# Altium footprint library AVP32F069_EVM_Rev1.0_220506.PcbLib: 40 footprints (part 2 of 3)
Each footprint in its own frame and in the unit in brackets; x right, y up, seen from the top. Pads: shape width x height; smd on the part's side, far side on the other; paste and mask are expansions set on the pad; w line width, h text height; cw(c..) or ccw(c..) is an arc to the next point about the centre after c.
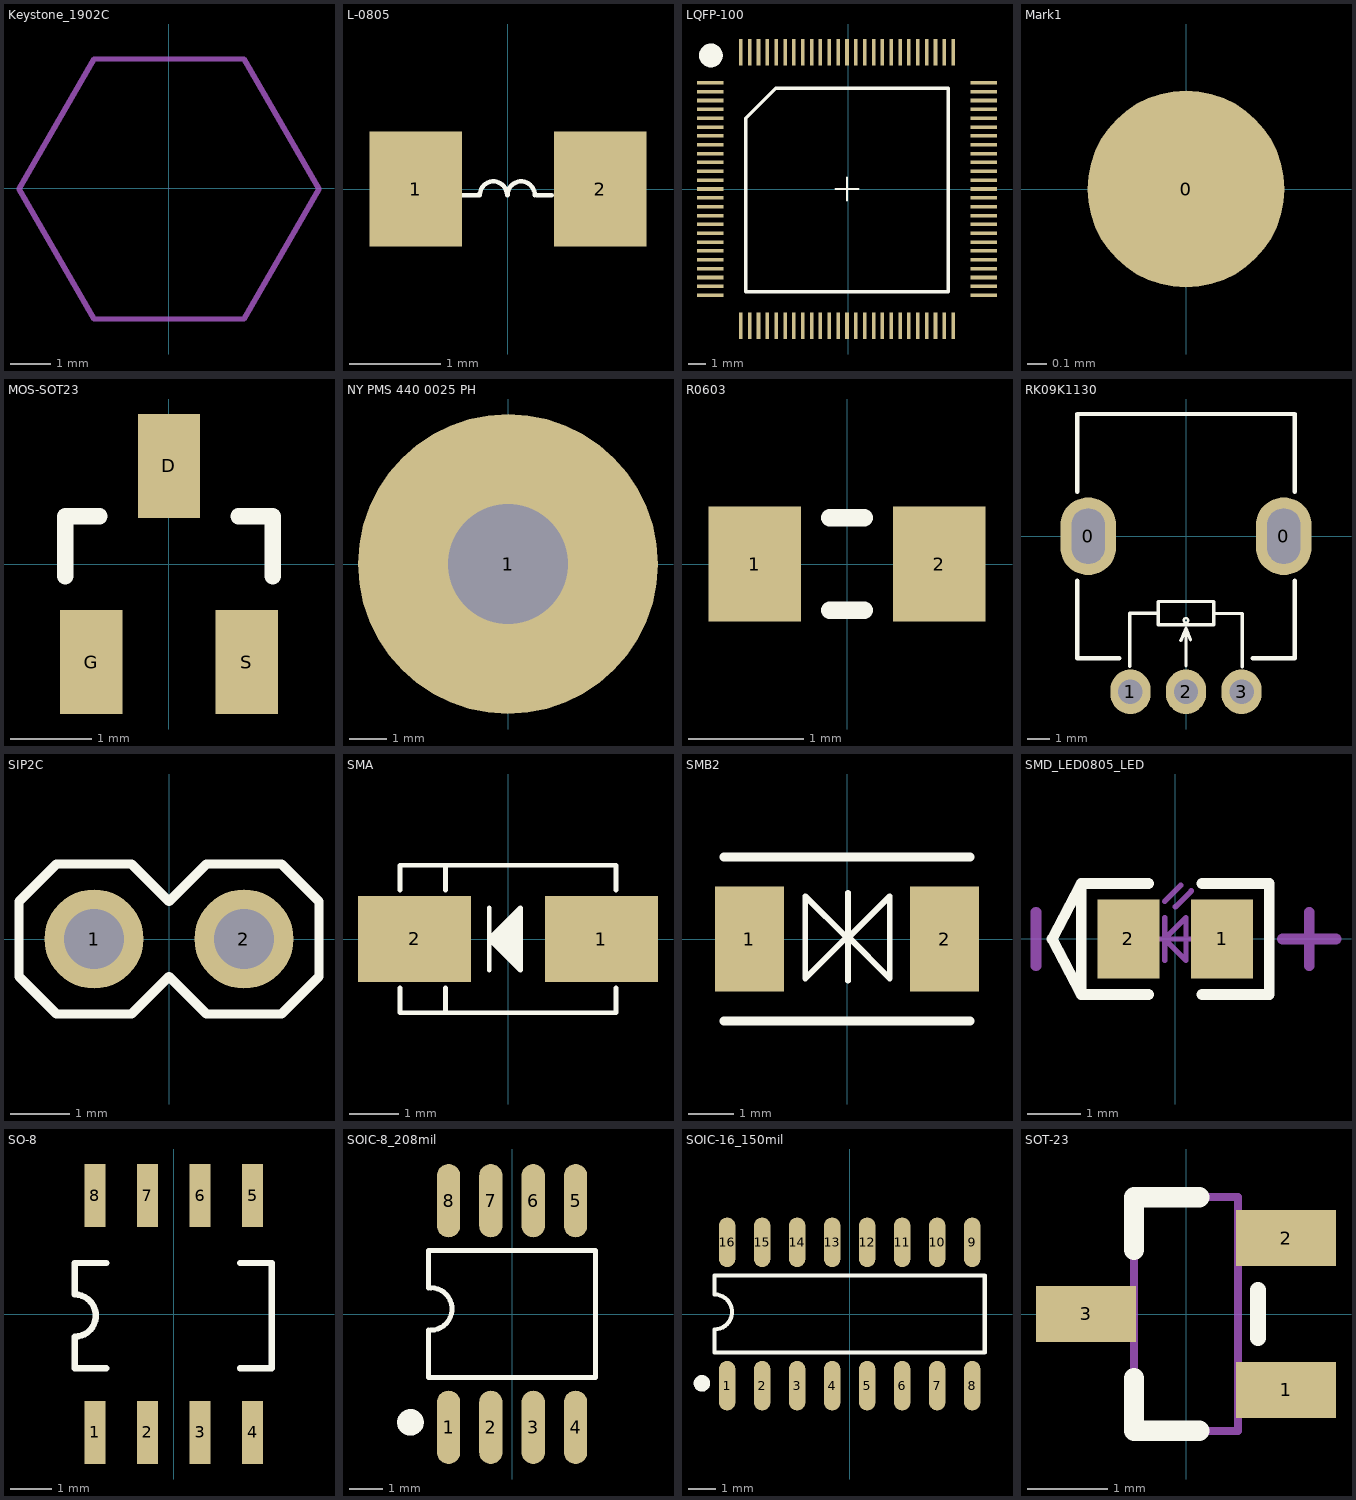
[diagram p1: the footprints below, top view; thin cyan lines are the x and y axes]

## Keystone_1902C [mil] "Hex Standoff, 4-40 threaded, nylon"
height 500
pads (1):
  round 1 on Mech4: 0(0,0)
Mechanical 6:
  lines w5: -145.29,-0.49 -72.56,125.49 72.92,125.49 145.65,-0.49 72.92,-126.47 -72.56,-126.47 -145.29,-0.49
3D body "Keystone_1902C.stp": height 501, standoff 1, extent -144.95,-125.98 146,125.98

## L-0805 [mil] "标准型  间距40mil 电感"
height 196.85
pads (2):
  rect 40x50 smd: 1(-40,0) 2(40,0)
Top Overlay:
  lines w1.97: -20,-2.61 -13,-2.61 ; -12.22,-2.62 cw(c-6.32,-2.62) -0.41,-2.62 ; -0.22,-2.62 cw(c5.68,-2.62) 11.59,-2.62 ; 12.53,-2.61 19,-2.61
3D body "User Library-Ferrite Beads(BLM21PG221SZ1D).step": height 36.42, standoff 2.95, extent -39.37,-25.6 39.37,23.61

## LQFP-100 [mm]
pads (100):
  rect 1.5x0.2 smd: 1(-7.807,6.006) 2(-7.807,5.506) 3(-7.807,5.006) 4(-7.807,4.506) 5(-7.807,4.006) 6(-7.807,3.506) 7(-7.807,3.006) 8(-7.807,2.506) 9(-7.807,2.006) 10(-7.807,1.506) 11(-7.807,1.006) 12(-7.807,0.506) 13(-7.807,0.006) 14(-7.807,-0.494) 15(-7.807,-0.994) 16(-7.807,-1.494) 17(-7.807,-1.994) 18(-7.807,-2.494) 19(-7.807,-2.994) 20(-7.807,-3.494) 21(-7.807,-3.994) 22(-7.807,-4.494) 23(-7.807,-4.994) 24(-7.807,-5.494) 25(-7.807,-5.994) 51(7.643,-5.994) 52(7.643,-5.494) 53(7.643,-4.994) 54(7.643,-4.494) 55(7.643,-3.994) 56(7.643,-3.494) 57(7.643,-2.994) 58(7.643,-2.494) 59(7.643,-1.994) 60(7.643,-1.494) 61(7.643,-0.994) 62(7.643,-0.494) 63(7.643,0.006) 64(7.643,0.506) 65(7.643,1.006) 66(7.643,1.506) 67(7.643,2.006) 68(7.643,2.506) 69(7.643,3.006) 70(7.643,3.506) 71(7.643,4.006) 72(7.643,4.506) 73(7.643,5.006) 74(7.643,5.506) 75(7.643,6.006)
  rect 0.2x1.5 smd: 26(-6.082,-7.719) 27(-5.582,-7.719) 28(-5.082,-7.719) 29(-4.582,-7.719) 30(-4.082,-7.719) 31(-3.582,-7.719) 32(-3.082,-7.719) 33(-2.582,-7.719) 34(-2.082,-7.719) 35(-1.582,-7.719) 36(-1.082,-7.719) 37(-0.582,-7.719) 38(-0.082,-7.719) 39(0.418,-7.719) 40(0.918,-7.719) 41(1.418,-7.719) 42(1.918,-7.719) 43(2.418,-7.719) 44(2.918,-7.719) 45(3.418,-7.719) 46(3.918,-7.719) 47(4.418,-7.719) 48(4.918,-7.719) 49(5.418,-7.719) 50(5.918,-7.719) 76(5.918,7.731) 77(5.418,7.731) 78(4.918,7.731) 79(4.418,7.731) 80(3.918,7.731) 81(3.418,7.731) 82(2.918,7.731) 83(2.418,7.731) 84(1.918,7.731) 85(1.418,7.731) 86(0.918,7.731) 87(0.418,7.731) 88(-0.082,7.731) 89(-0.582,7.731) 90(-1.082,7.731) 91(-1.582,7.731) 92(-2.082,7.731) 93(-2.582,7.731) 94(-3.082,7.731) 95(-3.582,7.731) 96(-4.082,7.731) 97(-4.582,7.731) 98(-5.082,7.731) 99(-5.582,7.731) 100(-6.082,7.731)
Top Overlay:
  circle w0.7: c-7.77,7.55 r0.32
  lines w0.127: -0.717,0.006 0.553,0.006 ; -0.082,-0.629 -0.082,0.641
  lines w0.2: -5.8,-5.35 -5.8,4 -4.1,5.7 5.65,5.7 5.65,-5.8 -5.8,-5.8 -5.8,-4.8
3D body "User Library-P-LQFP100-14x14-0_50.STEP": height 2, standoff 0, extent -8.176,-8.1 8.024,8.1

## Mark1 [mm] "基准点 无边框"
pads (1):
  round 1 all layers, no hole: 0(0,0)
Top Solder:
  circle w0.5: c0,0 r0.762
Bottom Solder:
  circle w0.5: c0,0 r0.762

## MOS-SOT23 [mm] "焊盘加长型"
height 2
pads (3):
  rect 0.762x1.27 smd: D(0,1.2) G(-0.95,-1.2) S(0.95,-1.2)
Top Overlay:
  lines w0.2: -1.27,-0.15 -1.27,0.584 -0.85,0.584 ; 0.85,0.584 1.27,0.584 1.27,-0.15
3D body "SOT-23-3.STEP": height 1.2, standoff 0, extent -1.45,-1.502 1.45,1.298

## NY PMS 440 0025 PH [mm] "4-40 nylon screw and mounting hole"
height 1.905
pads (1):
  round 8 hole 3.2: 1(0,0)
Mechanical 5:
  circle w0.127: c0,0 r3.789
3D body "B_F_NY PMS 440 0025 PH.stp": height 2.69, standoff -8.74, extent -3.302,-3.3 3.296,3.3

## R0603 [mm] "无丝印 脚距1.6mm  0.8/1mm 焊盘"
height 1.2
pads (2):
  rect 0.8x1 smd mask+0.051: 1(-0.8,0) 2(0.8,0)
Top Overlay:
  lines w0.152: -0.15,-0.4 0.15,-0.4 ; -0.15,0.4 0.15,0.4
3D body "RES-0603.step": height 0.43, standoff -0.03, extent -0.786,-0.4 0.814,0.4

## RK09K1130 [mm] "立式可调电位器"
height 9.5
pads (5):
  oval 2.5x3.5 hole 1.5 slot 2.5 at 90 deg: 0(-4.4,0) 0(4.4,0)
  oval 1.8x2 hole 1.1: 1(-2.5,-7) 2(0,-7) 3(2.5,-7)
Top Overlay:
  circle w0.1: c-0.002,-3.784 r0.1
  lines w0.15: -2.525,-5.857 -2.525,-3.469 -1.247,-3.469 -1.247,-2.941 1.243,-2.941 1.243,-3.982 -1.247,-3.982 -1.247,-3.474 ; -0.231,-4.693 -0.002,-4.135 ; -0.002,-5.836 -0.002,-4.135 ; 0.201,-4.668 -0.002,-4.135 ; 1.243,-3.474 2.538,-3.474 ; 2.529,-5.882 2.529,-3.495
  lines w0.2: -4.9,-2 -4.9,-5.5 -3,-5.5 ; -4.9,2 -4.9,5.5 4.863,5.5 4.877,5.486 4.886,5.486 4.9,5.5 4.9,2 ; 3,-5.5 4.9,-5.5 4.9,-2
3D body "User Library-RK09K1130-20-1.step": height 19.5, standoff -4.2, extent -5.698,-7.152 5.698,5.498

## SIP2C [mil] "带短路帽"
height 47.24
pads (2):
  round 66 hole 40 paste-4: 1(-50,0) 2(50,0)
Top Overlay:
  lines w6: -100,-25 -75,-50 -25,-50 0,-25 25,-50 75,-50 100,-25 100,25 75,50 25,50 0,25 -25,50 -75,50 -100,25 -100,-25
Mechanical 16:
  rectangle: -60,-10 -40,10
  rectangle: 40,-10 60,10
3D body "User Library-PLD-2.step": height 336.22, standoff -118.11, extent -100,-50 100,50
3D body "SNT-100-XX-X.stp": height 344, standoff 104, extent -100,-52.1 100,48

## SMA [mm] "DO-214AC"
height 8
pads (2):
  rect 2.3x1.75 smd: 1(1.9,0) 2(-1.9,0)
Top Overlay:
  lines w0.1: -2.2,-1 -2.2,-1.5 2.2,-1.5 2.2,-1 ; -2.2,1 -2.2,1.5 2.2,1.5 2.2,1 ; -1.27,-1.5 -1.27,-1 ; -1.27,1 -1.27,1.5 ; -0.381,-0.635 -0.381,0.635 ; -0.381,-0.025 -0.087,-0.025 ; -0.381,0.051 0.071,0.051 ; -0.193,-0.188 -0.193,0.188 ; -0.168,-0.213 -0.168,0.213 ; -0.087,-0.294 -0.087,0.294 ; -0.011,-0.37 -0.011,0.37 ; 0.049,-0.43 0.049,0.43 ; 0.096,-0.477 0.096,0.477 0.183,0.477 0.183,-0.564 ; -0.381,0 0.254,0.635 0.254,-0.635 -0.381,0
3D body "DO-214AC.STEP": height 2.4, standoff 0, extent -2.3,-1.372 2.3,1.328

## SMB2 [mm] "双向TVS"
pads (2):
  rect 1.52x2.3 smd: 1(-2.14,0) 2(2.14,0)
Top Overlay:
  lines w0.127: 0,0.025 -0.914,0.94 -0.914,-0.864 0,0.051 ; 0.025,-0.914 0.025,1.016 ; 0.025,0.025 0.939,0.94 0.939,-0.864 0.025,0.051
  lines w0.2: -2.7,-1.8 2.7,-1.8 ; -2.7,1.8 2.7,1.8
3D body "User Library-DO-214AA SMB.step": height 2.3, standoff 0, extent -2.7,-1.8 2.7,1.8

## SMD_LED0805_LED [mm]
height 11
pads (2):
  rect 1.16x1.47 smd: 1(0.875,0) 2(-0.875,0)
Top Overlay:
  lines w0.2: -0.5,-1.035 -1.755,-1.035 ; -0.5,1.035 -1.755,1.035 ; 0.5,-1.035 1.755,-1.035 1.755,1.035 0.5,1.035 ; -1.755,-1.035 -1.755,1.035 ; -1.755,-1.035 -2.3,0 -1.755,1.035
Mechanical 13:
  lines w0.1: -0.4,0 0.4,0 ; -0.2,-0.4 -0.2,0.4 ; -0.2,0.7 0.1,1 ; 0,0.6 0.3,0.9 ; -0.2,0 0.2,0.4 0.2,-0.4 -0.2,0
Mechanical 15:
  lines w0.203: -2.6,-0.5 -2.6,0.5 ; 2,0 3,0 ; 2.5,-0.5 2.5,0.5
3D body "User Library-led_0805.step": height 1.1, standoff 0, extent -1.01,-0.625 1.01,0.625

## SO-8 [mil]
pads (8):
  rect 20x60 smd: 1(-75,-112.5) 2(-25,-112.5) 3(25,-112.5) 4(75,-112.5) 5(75,112.5) 6(25,112.5) 7(-25,112.5) 8(-75,112.5)
Top Overlay:
  lines w6: -64,-51.5 -94,-51.5 -94,-21.5 ccw(c-94,-1.5) -94,18.5 -94,48.5 -64,48.5 ; 63,-51.5 93,-51.5 93,48.5 63,48.5
3D body "m08a.stp": height 63.98, standoff 0, extent -96.45,-111.1 96.46,125.12

## SOIC-8_208mil [mm]
height 10
pads (8):
  oval 0.7x2.2 smd: 1(-1.905,-3.4) 2(-0.635,-3.4) 3(0.635,-3.4) 4(1.905,-3.4) 5(1.905,3.4) 6(0.635,3.4) 7(-0.635,3.4) 8(-1.905,3.4)
Top Overlay:
  circle w0.4: c-3.048,-3.251 r0.2
  lines w0.15: -2.5,-0.483 -2.5,-1.9 2.5,-1.9 2.5,1.9 -2.5,1.9 -2.5,0.787 ; -2.438,-0.483 ccw(c-2.438,0.152) -2.438,0.787
3D body "User Library-SOIC8_Wide_5mmx5mm.step": height 1.75, standoff -0.01, extent -2.73,-4.001 2.73,4.101

## SOIC-16_150mil [mm]
height 6.34
pads (16):
  oval 0.6x1.8 smd: 1(-4.445,-2.6) 2(-3.175,-2.6) 3(-1.905,-2.6) 4(-0.635,-2.6) 5(0.635,-2.6) 6(1.905,-2.6) 7(3.175,-2.6) 8(4.445,-2.6) 9(4.445,2.6) 10(3.175,2.6) 11(1.905,2.6) 12(0.635,2.6) 13(-0.635,2.6) 14(-1.905,2.6) 15(-3.175,2.6) 16(-4.445,2.6)
Top Overlay:
  circle w0.3: c-5.359,-2.515 r0.15
  lines w0.15: -4.902,1.397 -4.902,0.711 cw(c-4.902,0.076) -4.902,-0.559 -4.902,-1.397 -4.899,-1.4 4.9,-1.4 4.9,1.4 -4.9,1.4
3D body "SW3DPS-SO-16-DEFAULT.step": height 1.45, standoff 0, extent -5.004,-2.8 4.978,3.105

## SOT-23 [mm]
height 6.5
pads (3):
  rect 1.25x0.7 smd: 1(1.25,-0.95) 2(1.25,0.95) 3(-1.25,0)
Top Overlay:
  lines w0.2: 0.9,-0.3 0.9,0.3
  lines w0.254: -0.65,-0.8 -0.65,-1.46 0.165,-1.46 ; 0.165,1.46 -0.65,1.46 ; -0.65,0.8 -0.65,1.46 ; -0.65,0.8 -0.65,1.46 ; -0.65,0.8 -0.65,1.46
Mechanical 13:
  lines w0.1: -0.65,-1.46 -0.65,1.46 ; -0.65,-1.46 0.65,-1.46 ; -0.65,-1.46 0.65,-1.46 ; -0.65,-1.46 -0.65,1.46 ; -0.65,-1.46 0.65,-1.46 ; -0.65,-1.46 -0.65,1.46 ; -0.65,1.46 0.65,1.46 ; -0.65,1.46 0.65,1.46 ; -0.65,1.46 0.65,1.46 ; 0.65,-1.46 0.65,1.46 ; 0.65,-1.46 0.65,1.46 ; 0.65,-1.46 0.65,1.46
3D body "SOT-23.step": height 1.3, standoff 0, extent -1.5,-1.5 1.5,1.5